# Altium schematic symbol library DIODE - B240A-13-F.SchLib: 1 symbol
Pins are listed as number, name and electrical type; pins without a type are passive.

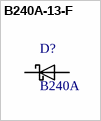
[diagram p0: symbol B240A-13-F]

## B240A-13-F
designator D?, comment B240A
Schottky Diode 40 V 2A Surface Mount SMA; Manufacturer: Diodes Incorporated; Manufacturer Part Number: B240A-13-F; Supplier 1: DigiKey; Supplier Part Number 1: B240A-FDICT-ND; Supplier 2: LCSC; Supplier Part Number 2: C92506; Category: Single Diodes; Case/Package: DO-214AC, SMA; Supplier Device Package: SMA; Operating Temperature: -65°C ~ 150°C; Lifecycle Status: Active; ComponentLink1Description: Datasheet; ComponentLink1URL: https://www.diodes.com/assets/Datasheets/B220_A-B260_A.pdf; ComponentLink2Description: DigiKey; ComponentLink2URL: https://www.digikey.com/en/products/result?keywords=B240A-13-F
footprint SMA - DIODES (Huella SMA - DIODES)
pins: 1 K, 2 A